# Altium footprint library WR-WTB_2.00mm.PcbLib: 70 footprints (part 1 of 5)
Each footprint in its own frame and in the unit in brackets; x right, y up, seen from the top. Pads: shape width x height; smd on the part's side, far side on the other; paste and mask are expansions set on the pad; w line width, h text height; cw(c..) or ccw(c..) is an arc to the next point about the centre after c.
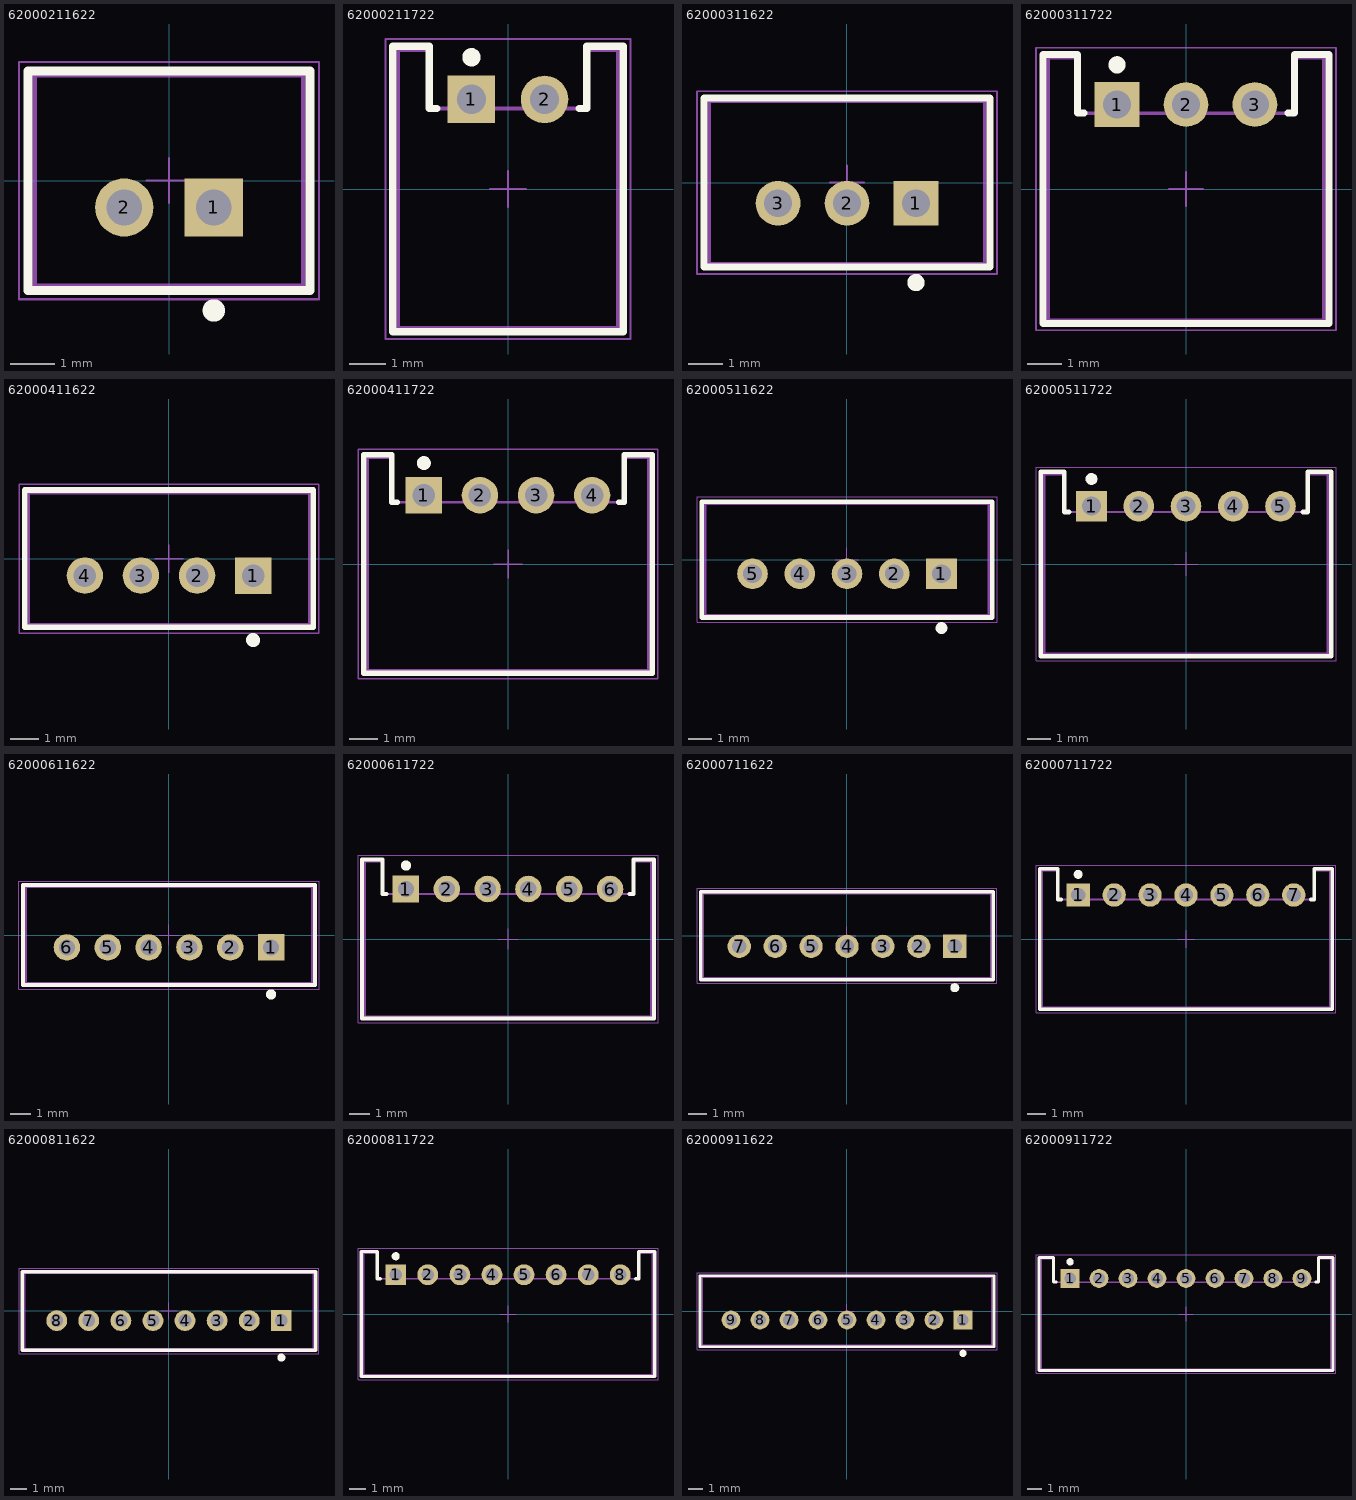
[diagram p0: the footprints below, top view; thin cyan lines are the x and y axes]

## 62000211622 [mm] "2.00mm Male Vertical Shrouded Header, 2p"
height 6.1
pads (2):
  rect 1.3x1.3 hole 0.8: 1(1,-0.6)
  round 1.3 hole 0.8: 2(-1,-0.6)
Top Overlay:
  circle w0.25: c1,-2.9 r0.125
  lines w0.2: -3.15,-2.45 -3.15,2.45 3.15,2.45 3.15,-2.45 -3.15,-2.45
Mechanical 13:
  lines w0.1: -3,-2.35 3,-2.35 3,2.35 -3,2.35 -3,-2.35
Mechanical 15:
  lines w0.05: -0.5,0 0.5,0 ; 0,-0.5 0,0.5 ; -3.35,-2.65 -3.35,2.65 3.35,2.65 3.35,-2.65 -3.35,-2.65
3D body "62000211622.stp": height 6.13, standoff -3.36, extent -3,-2.35 3,2.35

## 62000211722 [mm] "2.00mm Male Horizontal Shrouded Header, 2p"
height 4.5
pads (2):
  rect 1.3x1.3 hole 0.8: 1(-1,2.45)
  round 1.3 hole 0.8: 2(1,2.45)
Top Overlay:
  circle w0.25: c-1,3.6 r0.125
  lines w0.2: -1.95,2.2 -2.15,2.2 -2.15,3.9 -3.15,3.9 -3.15,-3.9 3.15,-3.9 3.15,3.9 2.15,3.9 2.15,2.2 1.95,2.2
Mechanical 13:
  lines w0.1: -3,-3.8 3,-3.8 3,3.8 2.15,3.8 2.15,2.2 -2.15,2.2 -2.15,3.8 -3,3.8 -3,-3.8
Mechanical 15:
  lines w0.05: -0.5,0 0.5,0 ; 0,-0.5 0,0.5 ; -3.35,-4.1 -3.35,4.1 3.35,4.1 3.35,-4.1 -3.35,-4.1
3D body "62000211722.stp": height 4.83, standoff -3.27, extent -3,-3.8 3,3.8

## 62000311622 [mm] "2.00mm Male Vertical Shrouded Header, 3p"
height 6.1
pads (3):
  rect 1.3x1.3 hole 0.8: 1(2,-0.6)
  round 1.3 hole 0.8: 2(0,-0.6) 3(-2,-0.6)
Top Overlay:
  circle w0.25: c2,-2.9 r0.125
  lines w0.2: -4.15,-2.45 -4.15,2.45 4.15,2.45 4.15,-2.45 -4.15,-2.45
Mechanical 13:
  lines w0.1: -4,-2.35 4,-2.35 4,2.35 -4,2.35 -4,-2.35
Mechanical 15:
  lines w0.05: -0.5,0 0.5,0 ; 0,-0.5 0,0.5 ; -4.35,-2.65 -4.35,2.65 4.35,2.65 4.35,-2.65 -4.35,-2.65
3D body "62000311622.stp": height 6.13, standoff -3.37, extent -4,-2.35 4,2.35

## 62000311722 [mm] "2.00mm Male Horizontal Shrouded Header, 3p"
height 4.5
pads (3):
  rect 1.3x1.3 hole 0.8: 1(-2,2.45)
  round 1.3 hole 0.8: 2(0,2.45) 3(2,2.45)
Top Overlay:
  circle w0.25: c-2,3.6 r0.125
  lines w0.2: -2.95,2.2 -3.15,2.2 -3.15,3.9 -4.15,3.9 -4.15,-3.9 4.15,-3.9 4.15,3.9 3.15,3.9 3.15,2.2 2.95,2.2
Mechanical 13:
  lines w0.1: -4,-3.8 -4,3.8 -3.15,3.8 -3.15,2.2 3.15,2.2 3.15,3.8 4,3.8 4,-3.8 -4,-3.8
Mechanical 15:
  lines w0.05: -0.5,0 0.5,0 ; 0,-0.5 0,0.5 ; -4.35,-4.1 4.35,-4.1 4.35,4.1 -4.35,4.1 -4.35,-4.1
3D body "62000311722.stp": height 4.83, standoff -3.27, extent -4,-3.8 4,3.8

## 62000411622 [mm] "2.00mm Male Vertical Shrouded Header, 4p"
height 6.1
pads (4):
  rect 1.3x1.3 hole 0.8: 1(3,-0.6)
  round 1.3 hole 0.8: 2(1,-0.6) 3(-1,-0.6) 4(-3,-0.6)
Top Overlay:
  circle w0.25: c3,-2.9 r0.125
  lines w0.2: -5.15,-2.45 5.15,-2.45 5.15,2.45 -5.15,2.45 -5.15,-2.45
Mechanical 13:
  lines w0.1: -5,-2.35 -5,2.35 5,2.35 5,-2.35 -5,-2.35
Mechanical 15:
  lines w0.05: -0.5,0 0.5,0 ; 0,-0.5 0,0.5 ; -5.35,-2.65 5.35,-2.65 5.35,2.65 -5.35,2.65 -5.35,-2.65
3D body "62000411622.stp": height 6.13, standoff -3.37, extent -5,-2.35 5,2.35

## 62000411722 [mm] "2.00mm Male Horizontal Shrouded Header, 4p"
height 4.5
pads (4):
  rect 1.3x1.3 hole 0.8: 1(-3,2.45)
  round 1.3 hole 0.8: 2(-1,2.45) 3(1,2.45) 4(3,2.45)
Top Overlay:
  circle w0.25: c-3,3.6 r0.125
  lines w0.2: -3.95,2.2 -4.15,2.2 -4.15,3.9 -5.15,3.9 -5.15,-3.9 5.15,-3.9 5.15,3.9 4.15,3.9 4.15,2.2 3.95,2.2
Mechanical 13:
  lines w0.1: -5,-3.8 5,-3.8 5,3.8 4.15,3.8 4.15,2.2 -4.15,2.2 -4.15,3.8 -5,3.8 -5,-3.8
Mechanical 15:
  lines w0.05: -0.5,0 0.5,0 ; 0,-0.5 0,0.5 ; -5.35,-4.1 -5.35,4.1 5.35,4.1 5.35,-4.1 -5.35,-4.1
3D body "62000411722.stp": height 4.83, standoff -3.27, extent -5,-3.8 5,3.8

## 62000511622 [mm] "2.00mm Male Vertical Shrouded Header, 5p"
height 6.1
pads (5):
  rect 1.3x1.3 hole 0.8: 1(4,-0.6)
  round 1.3 hole 0.8: 2(2,-0.6) 3(0,-0.6) 4(-2,-0.6) 5(-4,-0.6)
Top Overlay:
  circle w0.25: c4,-2.9 r0.125
  lines w0.2: -6.15,-2.45 -6.15,2.45 6.15,2.45 6.15,-2.45 -6.15,-2.45
Mechanical 13:
  lines w0.1: -6,-2.35 6,-2.35 6,2.35 -6,2.35 -6,-2.35
Mechanical 15:
  lines w0.05: -0.5,0 0.5,0 ; 0,-0.5 0,0.5 ; -6.35,-2.65 -6.35,2.65 6.35,2.65 6.35,-2.65 -6.35,-2.65
3D body "62000511622.stp": height 6.13, standoff -3.37, extent -6,-2.35 6,2.35

## 62000511722 [mm] "2.00mm Male Horizontal Shrouded Header, 5p"
height 4.5
pads (5):
  rect 1.3x1.3 hole 0.8: 1(-4,2.45)
  round 1.3 hole 0.8: 2(-2,2.45) 3(0,2.45) 4(2,2.45) 5(4,2.45)
Top Overlay:
  circle w0.25: c-4,3.6 r0.125
  lines w0.2: -4.95,2.2 -5.15,2.2 -5.15,3.9 -6.15,3.9 -6.15,-3.9 6.15,-3.9 6.15,3.9 5.15,3.9 5.15,2.2 4.95,2.2
Mechanical 13:
  lines w0.1: -6,-3.8 -6,3.8 -5.15,3.8 -5.15,2.2 5.15,2.2 5.15,3.8 6,3.8 6,-3.8 -6,-3.8
Mechanical 15:
  lines w0.05: -0.5,0 0.5,0 ; 0,-0.5 0,0.5 ; -6.35,-4.1 6.35,-4.1 6.35,4.1 -6.35,4.1 -6.35,-4.1
3D body "62000511722.stp": height 4.83, standoff -3.27, extent -6,-3.8 6,3.8

## 62000611622 [mm] "2.00mm Male Vertical Shrouded Header, 6p"
height 6.1
pads (6):
  rect 1.3x1.3 hole 0.8: 1(5,-0.6)
  round 1.3 hole 0.8: 2(3,-0.6) 3(1,-0.6) 4(-1,-0.6) 5(-3,-0.6) 6(-5,-0.6)
Top Overlay:
  circle w0.25: c5,-2.9 r0.125
  lines w0.2: -7.15,-2.45 -7.15,2.45 7.15,2.45 7.15,-2.45 -7.15,-2.45
Mechanical 13:
  lines w0.1: -7,-2.35 7,-2.35 7,2.35 -7,2.35 -7,-2.35
Mechanical 15:
  lines w0.05: -0.5,0 0.5,0 ; 0,-0.5 0,0.5 ; -7.35,-2.65 -7.35,2.65 7.35,2.65 7.35,-2.65 -7.35,-2.65
3D body "62000611622.stp": height 6.13, standoff -3.37, extent -7,-2.35 7,2.35

## 62000611722 [mm] "2.00mm Male Horizontal Shrouded Header, 6p"
height 4.5
pads (6):
  rect 1.3x1.3 hole 0.8: 1(-5,2.45)
  round 1.3 hole 0.8: 2(-3,2.45) 3(-1,2.45) 4(1,2.45) 5(3,2.45) 6(5,2.45)
Top Overlay:
  circle w0.25: c-5,3.6 r0.125
  lines w0.2: -5.95,2.2 -6.15,2.2 -6.15,3.9 -7.15,3.9 -7.15,-3.9 7.15,-3.9 7.15,3.9 6.15,3.9 6.15,2.2 5.95,2.2
Mechanical 13:
  lines w0.1: -7,-3.8 -7,3.8 -6.15,3.8 -6.15,2.2 6.15,2.2 6.15,3.8 7,3.8 7,-3.8 -7,-3.8
Mechanical 15:
  lines w0.05: -0.5,0 0.5,0 ; 0,-0.5 0,0.5 ; -7.35,-4.1 7.35,-4.1 7.35,4.1 -7.35,4.1 -7.35,-4.1
3D body "62000611722.stp": height 4.83, standoff -3.27, extent -7,-3.8 7,3.8

## 62000711622 [mm] "2.00mm Male Vertical Shrouded Header, 7p"
height 6.1
pads (7):
  rect 1.3x1.3 hole 0.8: 1(6,-0.6)
  round 1.3 hole 0.8: 2(4,-0.6) 3(2,-0.6) 4(0,-0.6) 5(-2,-0.6) 6(-4,-0.6) 7(-6,-0.6)
Top Overlay:
  circle w0.25: c6,-2.9 r0.125
  lines w0.2: -8.15,-2.45 8.15,-2.45 8.15,2.45 -8.15,2.45 -8.15,-2.45
Mechanical 13:
  lines w0.1: -8,-2.35 -8,2.35 8,2.35 8,-2.35 -8,-2.35
Mechanical 15:
  lines w0.05: -0.5,0 0.5,0 ; 0,-0.5 0,0.5 ; -8.35,-2.65 8.35,-2.65 8.35,2.65 -8.35,2.65 -8.35,-2.65
3D body "62000711622.stp": height 6.13, standoff -3.37, extent -8,-2.35 8,2.35

## 62000711722 [mm] "2.00mm Male Horizontal Shrouded Header, 7p"
height 4.5
pads (7):
  rect 1.3x1.3 hole 0.8: 1(-6,2.45)
  round 1.3 hole 0.8: 2(-4,2.45) 3(-2,2.45) 4(0,2.45) 5(2,2.45) 6(4,2.45) 7(6,2.45)
Top Overlay:
  circle w0.25: c-6,3.6 r0.125
  lines w0.2: -6.95,2.2 -7.15,2.2 -7.15,3.9 -8.15,3.9 -8.15,-3.9 8.15,-3.9 8.15,3.9 7.15,3.9 7.15,2.2 6.95,2.2
Mechanical 13:
  lines w0.1: -8,-3.8 8,-3.8 8,3.8 7.15,3.8 7.15,2.2 -7.15,2.2 -7.15,3.8 -8,3.8 -8,-3.8
Mechanical 15:
  lines w0.05: -0.5,0 0.5,0 ; 0,-0.5 0,0.5 ; -8.35,-4.1 -8.35,4.1 8.35,4.1 8.35,-4.1 -8.35,-4.1
3D body "62000711722.stp": height 4.83, standoff -3.27, extent -8,-3.8 8,3.8

## 62000811622 [mm] "2.00mm Male Vertical Shrouded Header, 8p"
height 6.1
pads (8):
  rect 1.3x1.3 hole 0.8: 1(7,-0.6)
  round 1.3 hole 0.8: 2(5,-0.6) 3(3,-0.6) 4(1,-0.6) 5(-1,-0.6) 6(-3,-0.6) 7(-5,-0.6) 8(-7,-0.6)
Top Overlay:
  circle w0.25: c7,-2.9 r0.125
  lines w0.2: -9.15,-2.45 -9.15,2.45 9.15,2.45 9.15,-2.45 -9.15,-2.45
Mechanical 13:
  lines w0.1: -9,-2.35 9,-2.35 9,2.35 -9,2.35 -9,-2.35
Mechanical 15:
  lines w0.05: -0.5,0 0.5,0 ; 0,-0.5 0,0.5 ; -9.35,-2.65 -9.35,2.65 9.35,2.65 9.35,-2.65 -9.35,-2.65
3D body "62000811622.stp": height 6.13, standoff -3.37, extent -9,-2.35 9,2.35

## 62000811722 [mm] "2.00mm Male Horizontal Shrouded Header, 8p"
height 4.5
pads (8):
  rect 1.3x1.3 hole 0.8: 1(-7,2.45)
  round 1.3 hole 0.8: 2(-5,2.45) 3(-3,2.45) 4(-1,2.45) 5(1,2.45) 6(3,2.45) 7(5,2.45) 8(7,2.45)
Top Overlay:
  circle w0.25: c-7,3.6 r0.125
  lines w0.2: -7.95,2.2 -8.15,2.2 -8.15,3.9 -9.15,3.9 -9.15,-3.9 9.15,-3.9 9.15,3.9 8.15,3.9 8.15,2.2 7.95,2.2
Mechanical 13:
  lines w0.1: -9,-3.8 9,-3.8 9,3.8 8.15,3.8 8.15,2.2 -8.15,2.2 -8.15,3.8 -9,3.8 -9,-3.8
Mechanical 15:
  lines w0.05: -0.5,0 0.5,0 ; 0,-0.5 0,0.5 ; -9.35,-4.1 -9.35,4.1 9.35,4.1 9.35,-4.1 -9.35,-4.1
3D body "62000811722.stp": height 4.83, standoff -3.27, extent -9,-3.8 9,3.8

## 62000911622 [mm] "2.00mm Male Vertical Shrouded Header, 9p"
height 6.1
pads (9):
  rect 1.3x1.3 hole 0.8: 1(8,-0.6)
  round 1.3 hole 0.8: 2(6,-0.6) 3(4,-0.6) 4(2,-0.6) 5(0,-0.6) 6(-2,-0.6) 7(-4,-0.6) 8(-6,-0.6) 9(-8,-0.6)
Top Overlay:
  circle w0.25: c8,-2.9 r0.125
  lines w0.2: -10.15,-2.45 10.15,-2.45 10.15,2.45 -10.15,2.45 -10.15,-2.45
Mechanical 13:
  lines w0.1: -10,-2.35 -10,2.35 10,2.35 10,-2.35 -10,-2.35
Mechanical 15:
  lines w0.05: -0.5,0 0.5,0 ; 0,-0.5 0,0.5 ; -10.35,-2.65 10.35,-2.65 10.35,2.65 -10.35,2.65 -10.35,-2.65
3D body "62000911622.stp": height 6.13, standoff -3.37, extent -10,-2.35 10,2.35

## 62000911722 [mm] "2.00mm Male Horizontal Shrouded Header, 9p"
height 4.5
pads (9):
  rect 1.3x1.3 hole 0.8: 1(-8,2.45)
  round 1.3 hole 0.8: 2(-6,2.45) 3(-4,2.45) 4(-2,2.45) 5(0,2.45) 6(2,2.45) 7(4,2.45) 8(6,2.45) 9(8,2.45)
Top Overlay:
  circle w0.25: c-8,3.6 r0.125
  lines w0.2: -8.95,2.2 -9.15,2.2 -9.15,3.9 -10.15,3.9 -10.15,-3.9 10.15,-3.9 10.15,3.9 9.15,3.9 9.15,2.2 8.95,2.2
Mechanical 13:
  lines w0.1: -10,-3.8 -10,3.8 -9.15,3.8 -9.15,2.2 9.15,2.2 9.15,3.8 10,3.8 10,-3.8 -10,-3.8
Mechanical 15:
  lines w0.05: -0.5,0 0.5,0 ; 0,-0.5 0,0.5 ; -10.35,-4.1 10.35,-4.1 10.35,4.1 -10.35,4.1 -10.35,-4.1
3D body "62000911722.stp": height 4.83, standoff -3.27, extent -10,-3.8 10,3.8